# Altium integrated library smoke_ir_sensor.IntLib: 1 symbol
Pins are listed as number, name and electrical type; pins without a type are passive.

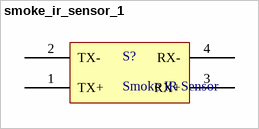
[diagram p0: symbol smoke_ir_sensor_1]

## smoke_ir_sensor_1
designator S?, comment Smoke IR Sensor
footprint smoke_ir_sensor_1
pins: 1 TX+, 2 TX-, 3 RX+, 4 RX-